# Altium footprint library LM393.PcbLib: 1 footprints
Each footprint in its own frame and in the unit in brackets; x right, y up, seen from the top. Pads: shape width x height; smd on the part's side, far side on the other; paste and mask are expansions set on the pad; w line width, h text height; cw(c..) or ccw(c..) is an arc to the next point about the centre after c.
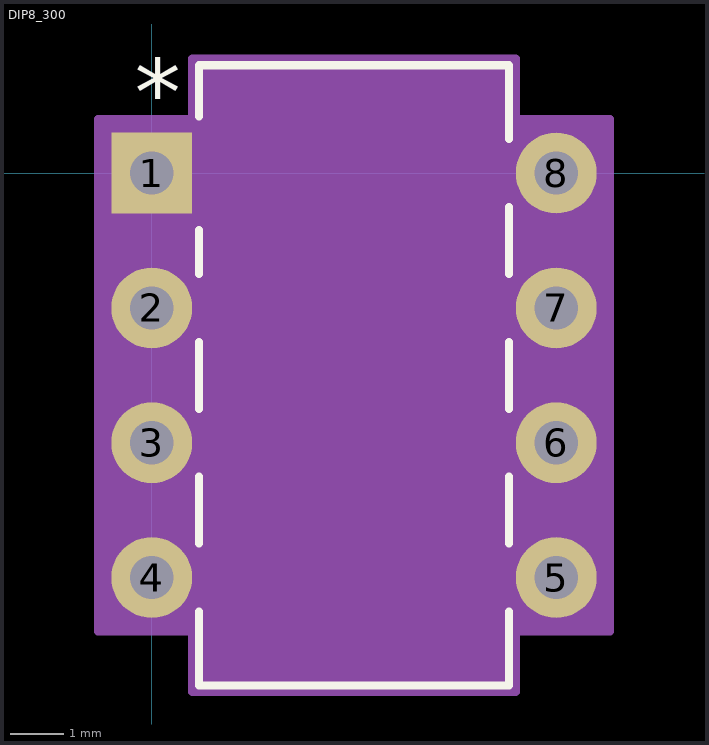
[diagram p0: the footprint, top view; thin cyan lines are the x and y axes]

## DIP8_300 [mil]
pads (8):
  rect 60x60 hole 32 paste-30 mask+0: 1(0,0)
  round 60 hole 32 paste-30 mask+0: 2(0,-100) 3(0,-200) 4(0,-300) 5(300,-300) 6(300,-200) 7(300,-100) 8(300,0)
Top Overlay:
  lines w6: 35,-325.15 35,-380 265,-380 265,-325.15 ; 35,-274.85 35,-225.15 ; 35,-174.85 35,-125.15 ; 35,-74.85 35,-42.11 ; 35,42.11 35,80 265,80 265,25.15 ; 265,-274.85 265,-225.15 ; 265,-174.85 265,-125.15 ; 265,-74.85 265,-25.15
  text "*" at -12.5,35 h50
  text ".Designator" at 12.5,-175 h50
Mechanical 13:
  lines w1: 138,75 ccw(c150,75) 162,75 ; -16,-316 -16,-284 40,-284 40,-316 -16,-316 ; -16,-216 -16,-184 40,-184 40,-216 -16,-216 ; -16,-116 -16,-84 40,-84 40,-116 -16,-116 ; -16,-16 -16,16 40,16 40,-16 -16,-16 ; 40,-375 260,-375 260,75 40,75 40,-375 ; 260,-316 260,-284 316,-284 316,-316 260,-316 ; 260,-216 260,-184 316,-184 316,-216 260,-216 ; 260,-116 260,-84 316,-84 316,-116 260,-116 ; 260,-16 260,16 316,16 316,-16 260,-16
  text ".Designator" at 12.5,-175 h50
  text "*" at 37.5,-25 h50
Mechanical 15:
  region: 270,-340 340,-340 340,40 270,40 270,85 30,85 30,40 -40,40 -40,-340 30,-340 30,-385 270,-385
  lines w6: -40,-340 -40,40 30,40 30,85 270,85 270,40 340,40 340,-340 270,-340 270,-385 30,-385 30,-340 -40,-340
3D body "DIP8_300.step": height 205.12, standoff -100, extent -5,-375 315,75